# Altium schematic symbol library UD34_Sym.SchLib: 5 symbols
Pins are listed as number, name and electrical type; pins without a type are passive.

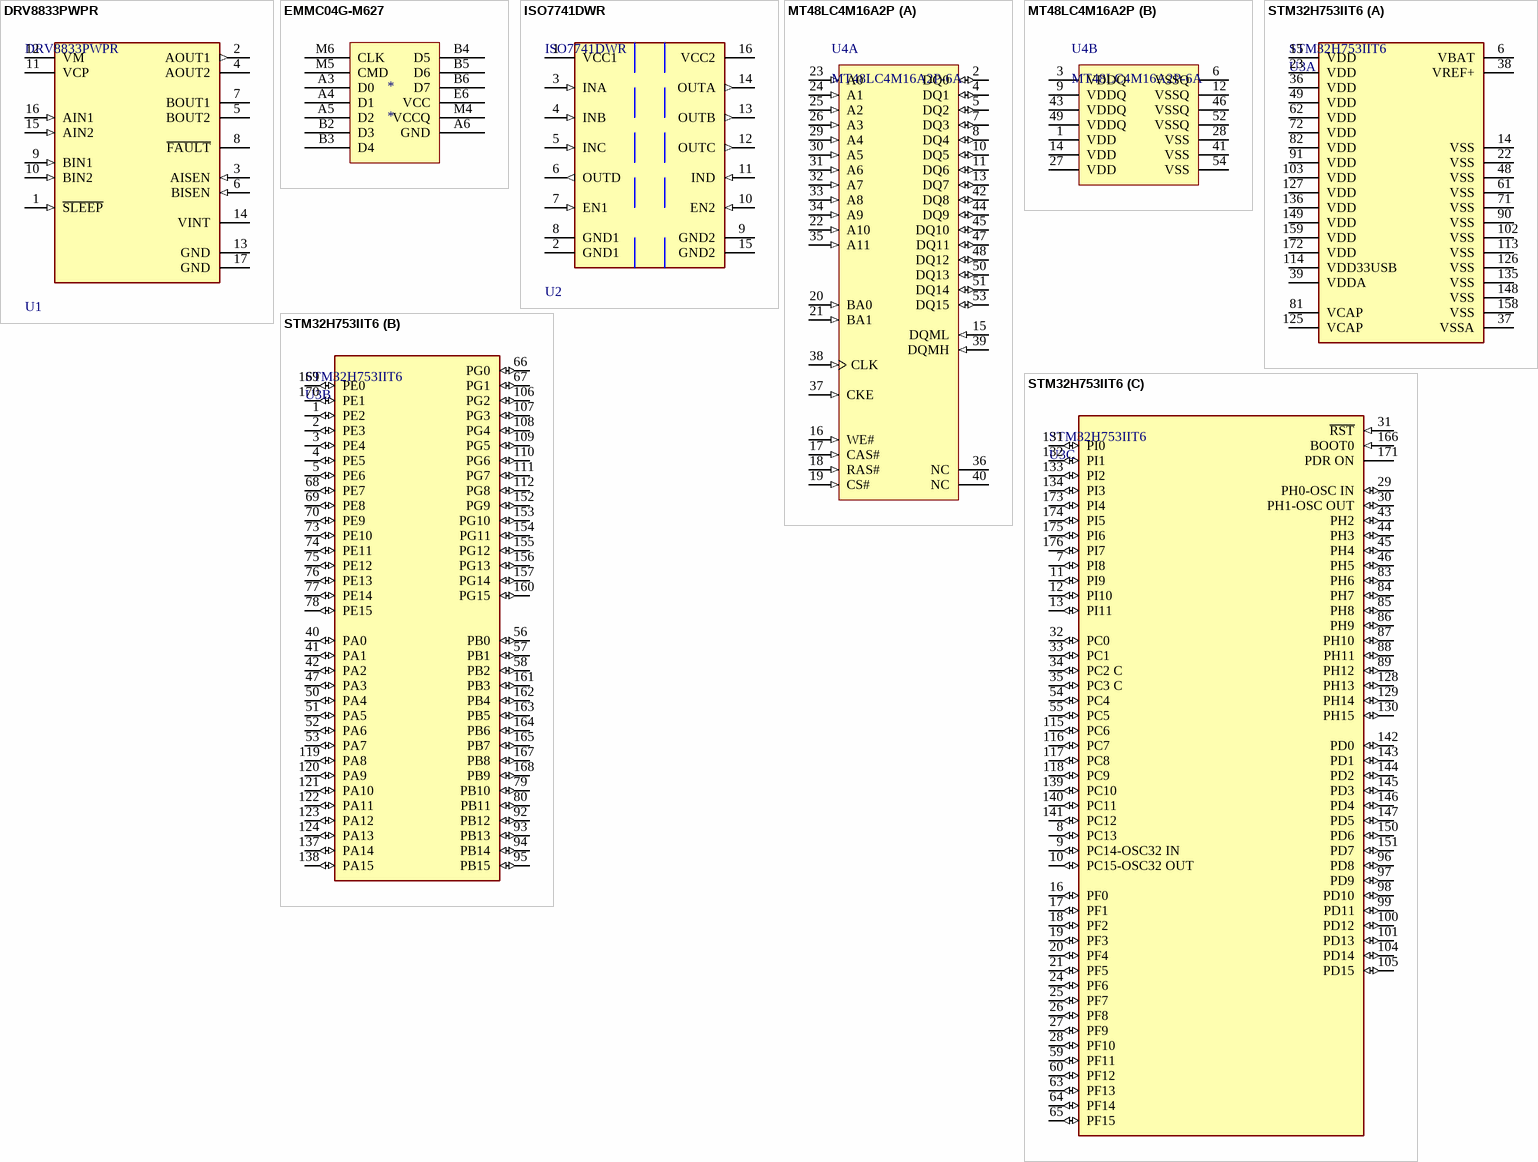
[diagram p0: symbols DRV8833PWPR to STM32H753IIT6]

## DRV8833PWPR
designator U1
IC MOTOR DRIVER PAR 16HTSSOP; Supply Current: 3mA; Max Output Current: 2A; Interface: PWM; Output Current: 1.5A; Max Supply Voltage: 10.8V; Fault Protection: Over Temperature; Number of Outputs: 2; Min Supply Voltage: 2.7V; Nominal Supply Current: 3mA; Series: DRV8833; Min Operating Temperature: -40°C; Package Quantity: 2000; Packaging: Tape and Reel; Case/Package: HTSSOP; Output Current per Channel: 1.5A; RoHS Compliant: Yes; RMS Current (Irms): 1.5A; Max Operating Temperature: 85°C; Technology: NMOS; Number of Pins: 16; Radiation Hardening: No; Lead Free: Lead Free; REACH SVHC: No SVHC
footprint FP-PWP0016C-IPC_A
footprint FP-PWP0016C-IPC_B
footprint FP-PWP0016C-IPC_C
footprint FP-PWP0016C-MFG
pins: 1 ~{SLEEP} (in), 2 AOUT1 (out), 3 AISEN (in), 4 AOUT2 (hiz), 5 BOUT2 (hiz), 6 BISEN (in), 7 BOUT1 (hiz), 8 ~{FAULT} (oc), 9 BIN1 (in), 10 BIN2 (in), 11 VCP, 12 VM (power), 13 GND (power), 14 VINT (power), 15 AIN2 (in), 16 AIN1 (in), 17 GND (power)

## EMMC04G-M627
designator *
pins: A3 D0, A4 D1, A5 D2, A6 GND, B2 D3, B3 D4, B4 D5, B5 D6, B6 D7, E6 VCC, M4 VCCQ, M5 CMD, M6 CLK

## ISO7741DWR
designator U2
DGTL ISO 5KV 4CH GEN PURP 16SOIC; Manufacturer: Texas Instruments; Nominal Supply Current: 1.5-18mA; Standoff Height: 0.1mm; Min Supply Voltage: 2.25V; Max Supply Voltage: 5.5V; Max Junction Temp: +150°C; ComponentLink2Description: Datasheet; Temperature Range Low: -55°C; Device Class L2: Interface ICs; Package: DW0016B; Temperature: -55°C to +125°C; Mouser Description: High-speed, low-power, robust EMC quad-channel digital isolator 16-SOIC -55 to 125; Octopart: https://octopart.com/iso7741dwr-texas+instruments-71651905; RoHS: TRUE; Category: IC; Ambient Temperature Range Low: -55°C; Height: 2.65mm; Device Class L3: unset; Device Class L1: Integrated Circuits (ICs); Digikey Description: DGTL ISO 5KV 4CH GEN PURP 16SOIC; Automotive: No; Temperature Range High: +125°C; Ambient Temperature Range High: +125°C; Lead Free: Yes; Manufacturer Part Number: ISO7741DWR; ComponentLink2URL: http://www.ti.com/lit/ds/symlink/iso7741.pdf; Ipc Land Pattern Name: SOIC127P1030X265-16
footprint FP-DW0016B-MFG
footprint FP-DW0016B-IPC_A
footprint FP-DW0016B-IPC_C
footprint FP-DW0016B-IPC_B
pins: 1 VCC1 (power), 2 GND1 (power), 3 INA (in), 4 INB (in), 5 INC (in), 6 OUTD (out), 7 EN1 (in), 8 GND1 (power), 9 GND2 (power), 10 EN2 (in), 11 IND (in), 12 OUTC (out), 13 OUTB (out), 14 OUTA (out), 15 GND2 (power), 16 VCC2 (power)

## MT48LC4M16A2P
designator U4, comment MT48LC4M16A2P-6A
64Mb PC133 SDR SDRAM, 4Mb x 16, 6ns, 3.3V, 0C to 70 degC, 54-Pin TSOP, Pb-Free; Manufacturer: Micron; Cycle Time: 6nsÂ; Voltage: 3.3VÂ; Op. Temp.: 0C to +70CÂ; CL: CL = 3Â; Density: 64MbÂ; Data Rate: PC133Â; Clock Rate: 166 MHzÂ; ComponentLink3URL: http://www.micron.com/~/media/Documents/Products/Data%20Sheet/DRAM/128mb_x4x8x16_sdram.pdf; Width: x16Â; Mounting Technology: Surface Mount; DatasheetVersion: Rev.Q; ComponentLink1Description: Manufacturer URL; ComponentLink2URL: http://www.micron.com/~/media/Documents/Products/Data%20Sheet/DRAM/128Mbx16x32Mobile.pdf; PackageDescription: 54-Pin Thin Small Outline Package, 10.16 x 22.22 mm, Pitch 0.8 mm; ComponentLink1URL: http://www.micron.com/; ComponentLink2Description: Datasheet; PackageVersion: Rev.Q; PartNumber: MT48LC4M16A2P-6A; RoHS: YesÂ; ComponentLink3Description: Package Specification; Depth: 4MbÂ; PackageReference: MICT-P-54
footprint MICT-P-54_N (SOP, 54-Leads, Body 22.22x10.16mm, Pitch 0.8mm, IPC Medium Density)
part A pins: 2 DQ0 (io) "Data input/output", 4 DQ1 (io) "Data input/output", 5 DQ2 (io) "Data input/output", 7 DQ3 (io) "Data input/output", 8 DQ4 (io) "Data input/output", 10 DQ5 (io) "Data input/output", 11 DQ6 (io) "Data input/output", 13 DQ7 (io) "Data input/output", 15 DQML (in) "Input/output mask: DQM is sampled HIGH and is an input mask signal for writ accesses and an output enable signal for read accesses. Input data is masked during a WRITE cycle. Theoutput buffers are High-Z (two-clock latency) (See Datasheet)", 16 WE# (in) "Command inputs: WE#define the command being entered", 17 CAS# (in) "Command inputs:CAS# define the command being entered", 18 RAS# (in) "Command inputs: RAS#define the command being entered", 19 CS# (in) "Chip select: CS# enables (registered LOW) and disables (registered HIGH) the command decoder.All commands are masked when CS# is registered HIGH, but READ/WRITE bursts already in progress will continue, and DQM operation (See Datasheet)", 20 BA0 (in) "Bank address input(s): BA[1:0] define to which bank the ACTIVE, READ, WRITE, or PRECHARGE command is being applied.", 21 BA1 (in) "Bank address input(s): BA[1:0] define to which bank the ACTIVE, READ, WRITE, or PRECHARGE command is being applied.", 22 A10 (in) "Address inputs: A[11:0] are sampled during the ACTIVE command (row address A[11:0]) and READ or WRITE command (column address  A[7:0] for x16; with A10 defining auto precharge) to select one location out of the memory array (See Datasheet)", 23 A0 (in) "Address inputs: A[11:0] are sampled during the ACTIVE command (row address A[11:0]) and READ or WRITE command (column address  A[7:0] for x16; with A10 defining auto precharge) to select one location out of the memory array (See Datasheet)", 24 A1 (in) "Address inputs: A[11:0] are sampled during the ACTIVE command (row address A[11:0]) and READ or WRITE command (column address  A[7:0] for x16; with A10 defining auto precharge) to select one location out of the memory array (See Datasheet)", 25 A2 (in) "Address inputs: A[11:0] are sampled during the ACTIVE command (row address A[11:0]) and READ or WRITE command (column address  A[7:0] for x16; with A10 defining auto precharge) to select one location out of the memory array (See Datasheet)", 26 A3 (in) "Address inputs: A[11:0] are sampled during the ACTIVE command (row address A[11:0]) and READ or WRITE command (column address  A[7:0] for x16; with A10 defining auto precharge) to select one location out of the memory array (See Datasheet)", 29 A4 (in) "Address inputs: A[11:0] are sampled during the ACTIVE command (row address A[11:0]) and READ or WRITE command (column address  A[7:0] for x16; with A10 defining auto precharge) to select one location out of the memory array (See Datasheet)", 30 A5 (in) "Address inputs: A[11:0] are sampled during the ACTIVE command (row address A[11:0]) and READ or WRITE command (column address  A[7:0] for x16; with A10 defining auto precharge) to select one location out of the memory array (See Datasheet)", 31 A6 (in) "Address inputs: A[11:0] are sampled during the ACTIVE command (row address A[11:0]) and READ or WRITE command (column address  A[7:0] for x16; with A10 defining auto precharge) to select one location out of the memory array (See Datasheet)", 32 A7 (in) "Address inputs: A[11:0] are sampled during the ACTIVE command (row address A[11:0]) and READ or WRITE command (column address  A[7:0] for x16; with A10 defining auto precharge) to select one location out of the memory array (See Datasheet)", 33 A8 (in) "Address inputs: A[11:0] are sampled during the ACTIVE command (row address A[11:0]) and READ or WRITE command (column address  A[7:0] for x16; with A10 defining auto precharge) to select one location out of the memory array (See Datasheet)", 34 A9 (in) "Address inputs: A[11:0] are sampled during the ACTIVE command (row address A[11:0]) and READ or WRITE command (column address  A[7:0] for x16; with A10 defining auto precharge) to select one location out of the memory array (See Datasheet)", 35 A11 (in) "Address inputs: A[11:0] are sampled during the ACTIVE command (row address A[11:0]) and READ or WRITE command (column address  A[7:0] for x16; with A10 defining auto precharge) to select one location out of the memory array (See Datasheet)", 36 NC "No connect: These should be left unconnected", 37 CKE (in) "Clock enable: CKE activates (HIGH) and deactivates (LOW) the CLK signal. Deactivating the clock provides precharge power-down and SELF REFRESH operation (all banks idle), active power-down (row active in any bank), or CLOCK (See Datasheet)", 38 CLK (in) "Clock: CLK is driven by the system clock. All SDRAM input signals are sampled on the positive edge of CLK. CLK also increments the internal burst counter and controls the output registers.", 39 DQMH (in) "Input/output mask: DQM is sampled HIGH and is an input mask signal for write accesses and an output enable signal for read accesses. Input data is masked during a WRITE cycle. The output buffers are High-Z (two-clock (See Datasheet)", 40 NC "No connect: These should be left unconnected", 42 DQ8 (io) "Data input/output: Data bus for x16", 44 DQ9 (io) "Data input/output: Data bus for x16", 45 DQ10 (io) "Data input/output: Data bus for x16", 47 DQ11 (io) "Data input/output: Data bus for x16", 48 DQ12 (io) "Data input/output: Data bus for x16", 50 DQ13 (io) "Data input/output: Data bus for x16", 51 DQ14 (io) "Data input/output: Data bus for x16", 53 DQ15 (io) "Data input/output: Data bus for x16"
part B pins: 1 VDD (power) "Power supply: 3.3V +/-0.3V.", 3 VDDQ (power) "DQ power: DQ power to the die for improved noise immunity.", 6 VSSQ (power) "DQ ground: DQ ground to the die for improved noise immunity", 9 VDDQ (power) "DQ power: DQ power to the die for improved noise immunity.", 12 VSSQ (power) "DQ ground: DQ ground to the die for improved noise immunity", 14 VDD (power) "Power supply: 3.3V +/-0.3V.", 27 VDD (power) "Power supply: 3.3V +/-0.3V.", 28 VSS (power) "Ground.", 41 VSS (power) "Ground", 43 VDDQ (power) "DQ power: DQ power to the die for improved noise immunity", 46 VSSQ (power) "DQ ground: DQ ground to the die for improved noise immunity", 49 VDDQ (power) "DQ power: DQ power to the die for improved noise immunity", 52 VSSQ (power) "DQ ground: DQ ground to the die for improved noise immunity", 54 VSS (power) "Ground."

## STM32H753IIT6
designator U3
LQFP 176 24X24X1.4; Manufacturer: STMicroelectronics; Number Of I/Os: 140; Standoff Height: 0.05mm; Memory Size: 2MBytes; Interface: I2C,SPI,UART,USART,CAN,USB,LIN,IrDA,Ethernet,I2S,SMBus,Other; Nominal Supply Current: 10-165mA; Number Of I2C Channels: 4; Number Of Timers/Counters: 20; Max Supply Voltage: 3.6V; Number Of Pwm Channels: 8; Max Junction Temp: +125°C; Number Of Uart Channels: 9; Memory Type: FLASH; Number Of Spi Channels: 6; Number Of Cores: 1; Ram Size: 1MBytes; Core Architecture: Arm Cortex-M7; Number Of Usb Channels: 2; Data Bus Width: 32bits; Frequency: 400MHz; Number Of Adc Channels: 36; Number Of A/D Converters: 3; Min Supply Voltage: 1.62V; Automotive: No; Ambient Temperature Range High: +85°C; Octopart: https://octopart.com/stm32h753iit6-stmicroelectronics-87680940; Digikey Description: LQFP 176 24X24X1.4; ComponentLink2URL: https://www.st.com/resource/en/datasheet/stm32h753ii.pdf; Manufacturer Part Number: STM32H753IIT6; RoHS: TRUE; Package: LQFP176-1T; Ambient Temperature Range Low: -40°C; Device Class L1: Integrated Circuits (ICs); Temperature: -40°C to +85°C; Ipc Land Pattern Name: QFP50P2600X2600X160-176; Category: IC; Lead Free: Yes; Device Class L2: Embedded Processors and Controllers; Temperature Range High: +85°C; ComponentLink2Description: Datasheet; Device Class L3: DSPs - Digital Signal Processors; Temperature Range Low: -40°C; Height: 1.6mm; Number Of Ethernet Channels: 1
footprint FP-LQFP176-1T-IPC_B
footprint FP-LQFP176-1T-IPC_A
footprint FP-LQFP176-1T-MFG
footprint FP-LQFP176-1T-IPC_C
part A pins: 6 VBAT (power), 14 VSS (power), 15 VDD (power), 22 VSS (power), 23 VDD (power), 36 VDD (power), 37 VSSA (power), 38 VREF+ (power), 39 VDDA (power), 48 VSS (power), 49 VDD (power), 61 VSS (power), 62 VDD (power), 71 VSS (power), 72 VDD (power), 81 VCAP (power), 82 VDD (power), 90 VSS (power), 91 VDD (power), 102 VSS (power), 103 VDD (power), 113 VSS (power), 114 VDD33USB (power), 125 VCAP (power), 126 VSS (power), 127 VDD (power), 135 VSS (power), 136 VDD (power), 148 VSS (power), 149 VDD (power), 158 VSS (power), 159 VDD (power), 172 VDD (power)
part B pins: 1 PE2 (io), 2 PE3 (io), 3 PE4 (io), 4 PE5 (io), 5 PE6 (io), 40 PA0 (io), 41 PA1 (io), 42 PA2 (io), 47 PA3 (io), 50 PA4 (io), 51 PA5 (io), 52 PA6 (io), 53 PA7 (io), 56 PB0 (io), 57 PB1 (io), 58 PB2 (io), 66 PG0 (io), 67 PG1 (io), 68 PE7 (io), 69 PE8 (io), 70 PE9 (io), 73 PE10 (io), 74 PE11 (io), 75 PE12 (io), 76 PE13 (io), 77 PE14 (io), 78 PE15 (io), 79 PB10 (io), 80 PB11 (io), 92 PB12 (io), 93 PB13 (io), 94 PB14 (io), 95 PB15 (io), 106 PG2 (io), 107 PG3 (io), 108 PG4 (io), 109 PG5 (io), 110 PG6 (io), 111 PG7 (io), 112 PG8 (io), 119 PA8 (io), 120 PA9 (io), 121 PA10 (io), 122 PA11 (io), 123 PA12 (io), 124 PA13 (io), 137 PA14 (io), 138 PA15 (io), 152 PG9 (io), 153 PG10 (io), 154 PG11 (io), 155 PG12 (io), 156 PG13 (io), 157 PG14 (io), 160 PG15 (io), 161 PB3 (io), 162 PB4 (io), 163 PB5 (io), 164 PB6 (io), 165 PB7 (io), 167 PB8 (io), 168 PB9 (io), 169 PE0 (io), 170 PE1 (io)
part C pins: 7 PI8 (io), 8 PC13 (io), 9 PC14-OSC32 IN (io), 10 PC15-OSC32 OUT (io), 11 PI9 (io), 12 PI10 (io), 13 PI11 (io), 16 PF0 (io), 17 PF1 (io), 18 PF2 (io), 19 PF3 (io), 20 PF4 (io), 21 PF5 (io), 24 PF6 (io), 25 PF7 (io), 26 PF8 (io), 27 PF9 (io), 28 PF10 (io), 29 PH0-OSC IN (io), 30 PH1-OSC OUT (io), 31 ~{RST} (in), 32 PC0 (io), 33 PC1 (io), 34 PC2 C (io), 35 PC3 C (io), 43 PH2 (io), 44 PH3 (io), 45 PH4 (io), 46 PH5 (io), 54 PC4 (io), 55 PC5 (io), 59 PF11 (io), 60 PF12 (io), 63 PF13 (io), 64 PF14 (io), 65 PF15 (io), 83 PH6 (io), 84 PH7 (io), 85 PH8 (io), 86 PH9 (io), 87 PH10 (io), 88 PH11 (io), 89 PH12 (io), 96 PD8 (io), 97 PD9 (io), 98 PD10 (io), 99 PD11 (io), 100 PD12 (io), 101 PD13 (io), 104 PD14 (io), 105 PD15 (io), 115 PC6 (io), 116 PC7 (io), 117 PC8 (io), 118 PC9 (io), 128 PH13 (io), 129 PH14 (io), 130 PH15 (io), 131 PI0 (io), 132 PI1 (io), 133 PI2 (io), 134 PI3 (io), 139 PC10 (io), 140 PC11 (io), 141 PC12 (io), 142 PD0 (io), 143 PD1 (io), 144 PD2 (io), 145 PD3 (io), 146 PD4 (io), 147 PD5 (io), 150 PD6 (io), 151 PD7 (io), 166 BOOT0 (in), 171 PDR ON (power), 173 PI4 (io), 174 PI5 (io), 175 PI6 (io), 176 PI7 (io)